# EAGLE library part IC_ZW10I8 (library dp_devices.v6)
ZW10I8 I2C PWM
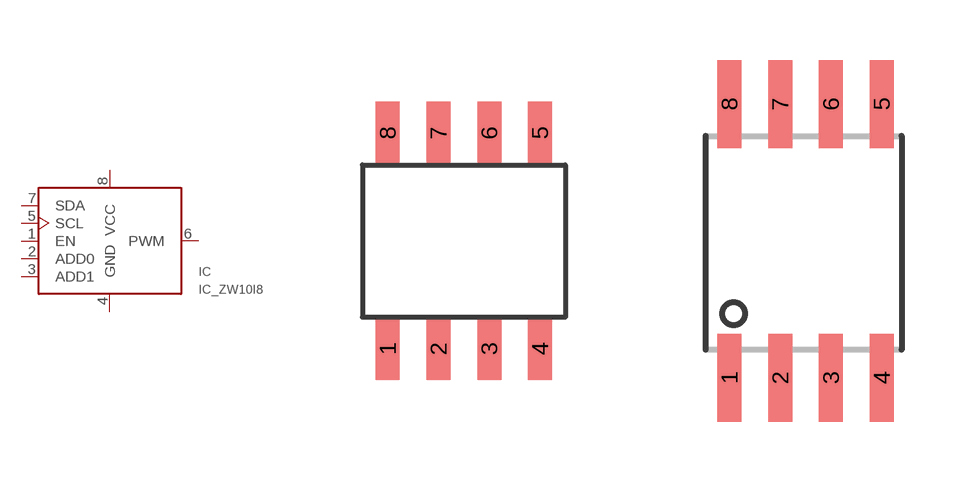
[diagram p189: symbol with the pads of SO-8; footprints SO-8, SOIC-8W]

Designator prefix IC

## IC_ZW10I8  [SO-8]
1  EN  in
2  ADD0  in
3  ADD1  in
4  GND  sup
5  SCL  in
6  PWM
7  SDA
8  VCC  sup

## IC_ZW10I8-W  [SOIC-8W]
Pads as for SO-8

## Footprint SO-8 (pad centres in mm)
smd 0.6 x 1.55: 1 -1.905,-2.69; 2 -0.635,-2.69; 3 0.635,-2.69; 4 1.905,-2.69; 5 1.905,2.71; 6 0.635,2.71; 7 -0.635,2.71; 8 -1.905,2.71

## Footprint SOIC-8W (pad centres in mm)
width: 208 mil (5.28 mm)
smd 0.6 x 2.2: 1 -1.905,-3.376; 2 -0.635,-3.376; 3 0.635,-3.376; 4 1.905,-3.376; 5 1.905,3.475; 6 0.635,3.475; 7 -0.635,3.475; 8 -1.905,3.475